# Altium footprint library UCP.PcbLib: 222 footprints (part 10 of 14)
Each footprint in its own frame and in the unit in brackets; x right, y up, seen from the top. Pads: shape width x height; smd on the part's side, far side on the other; paste and mask are expansions set on the pad; w line width, h text height; cw(c..) or ccw(c..) is an arc to the next point about the centre after c.
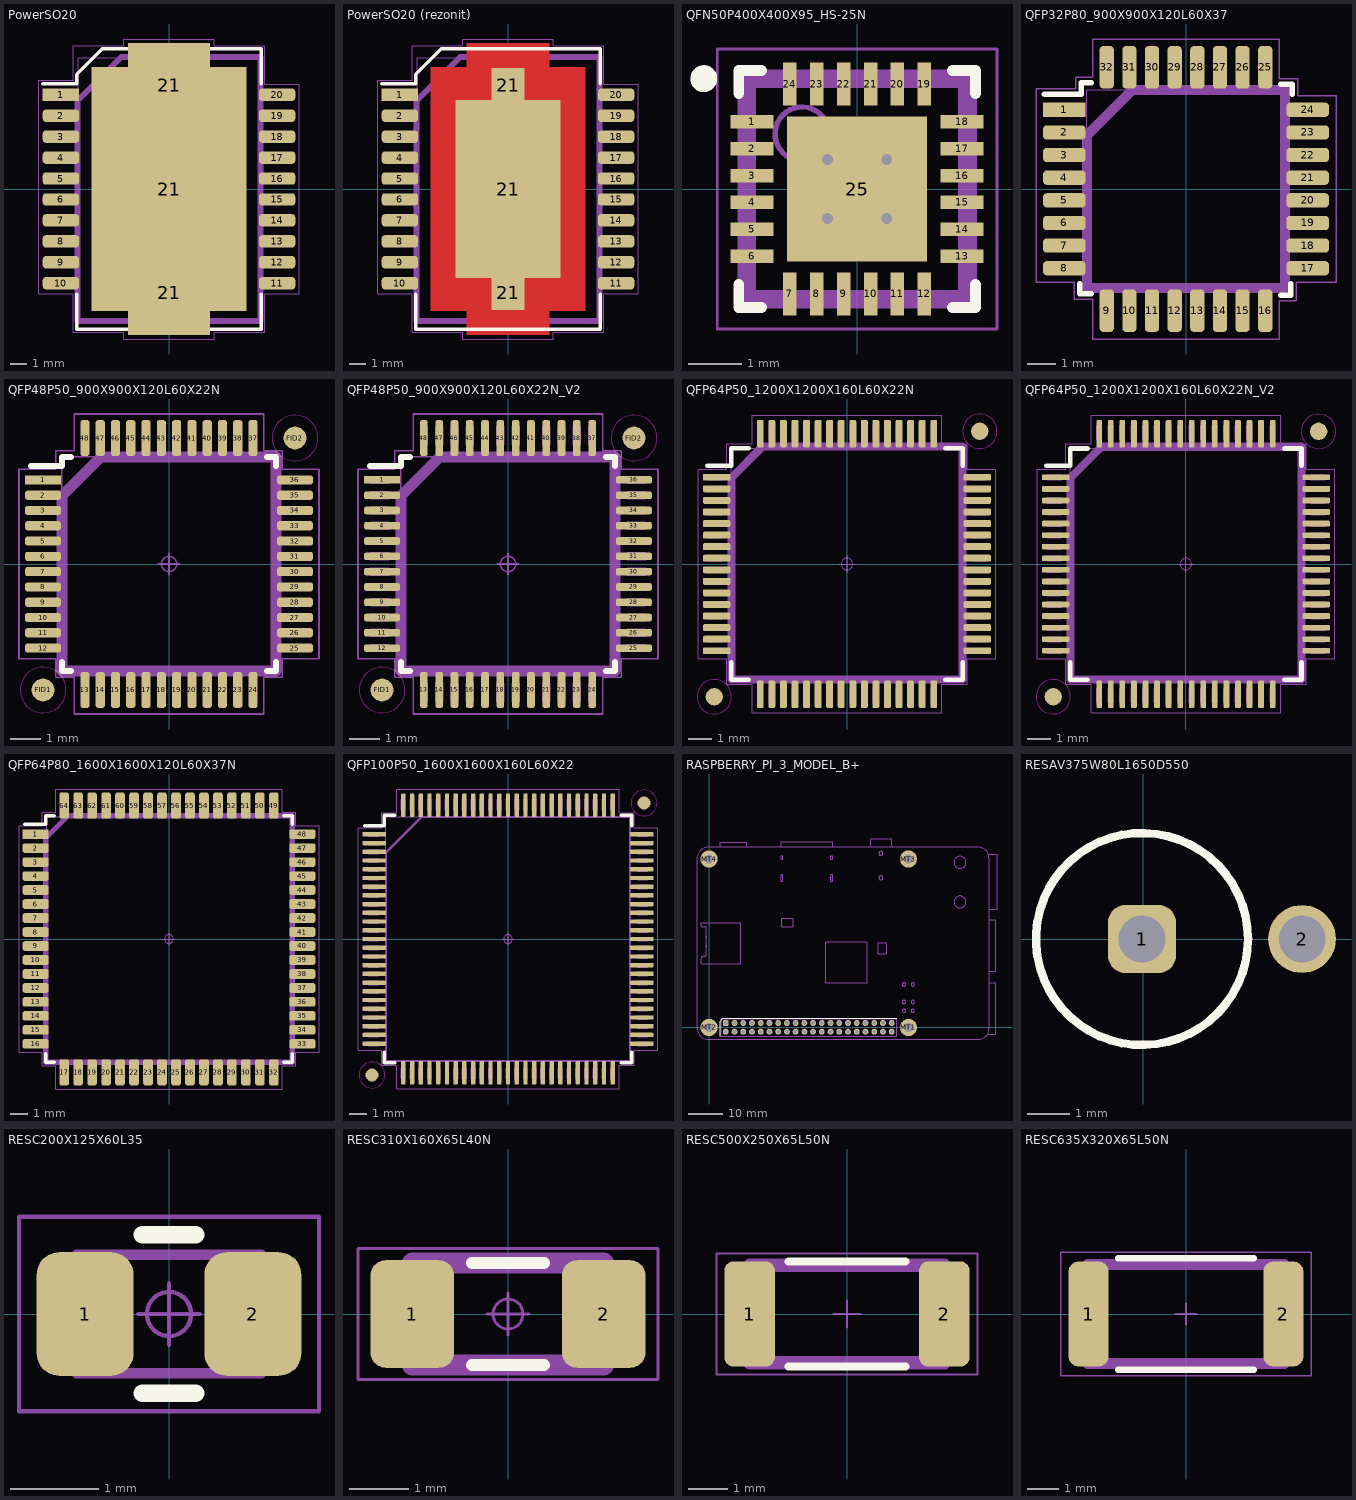
[diagram p9: the footprints below, top view; thin cyan lines are the x and y axes]

## PowerSO20 [mm] "Small Outline IC (SOIC), 1.27 mm pitch; 20 pin, 12.80 mm L X 7.50 mm W X 2.65 mm H body"
height 3.6
pads (23):
  rect 2.2x0.75 smd: 1(-6.56,5.715)
  rrect51% 2.2x0.75 smd: 2(-6.56,4.445) 3(-6.56,3.175) 4(-6.56,1.905) 5(-6.56,0.635) 6(-6.56,-0.635) 7(-6.56,-1.905) 8(-6.56,-3.175) 9(-6.56,-4.445) 10(-6.56,-5.715) 11(6.56,-5.715) 12(6.56,-4.445) 13(6.56,-3.175) 14(6.56,-1.905) 15(6.56,-0.635) 16(6.56,0.635) 17(6.56,1.905) 18(6.56,3.175) 19(6.56,4.445) 20(6.56,5.715)
  rect 5x5.1 smd paste-20 mask-10: 21(0,-6.3) 21(0,6.3)
  rect 9.4x14.8 smd paste-20 mask-10: 21(0,0)
Top Overlay:
  lines w0.2: -7.66,6.39 -5.6,6.39 -5.6,6.95 -4.05,8.5 5.6,8.5 5.6,6.39 ; -5.6,-6.39 -5.6,-8.5 5.6,-8.5 5.6,-6.39
Top Paste:
  region: -1.7,5.9 -1.7,8 -1.7,8.04 -1.67,8.113 -1.613,8.17 -1.54,8.2 -1.5,8.2 1.5,8.2 1.54,8.2 1.613,8.169 1.67,8.113 1.7,8.04 1.7,8 1.7,5.9 1.7,5.86 1.67,5.787 1.613,5.73 1.54,5.7 1.5,5.7 -1.5,5.7 -1.54,5.7 -1.613,5.73 -1.67,5.787 -1.7,5.86
  region: -1.7,-8.2 -1.7,-5.7 1.7,-5.7 1.7,-8.2
  region: -3.2,3.325 -3.2,4.175 -3.2,4.215 -3.17,4.288 -3.113,4.344 -3.04,4.375 -3,4.375 3,4.375 3.04,4.375 3.113,4.345 3.17,4.288 3.2,4.215 3.2,4.175 3.2,3.325 3.2,3.285 3.169,3.212 3.113,3.155 3.04,3.125 3,3.125 -3,3.125 -3.04,3.125 -3.113,3.155 -3.17,3.212 -3.2,3.285
  region: -3.2,0.825 -3.2,1.675 -3.2,1.715 -3.17,1.788 -3.113,1.844 -3.04,1.875 -3,1.875 3,1.875 3.04,1.875 3.113,1.845 3.17,1.788 3.2,1.715 3.2,1.675 3.2,0.825 3.2,0.785 3.169,0.712 3.113,0.655 3.04,0.625 3,0.625 -3,0.625 -3.04,0.625 -3.113,0.655 -3.17,0.712 -3.2,0.785
  region: 3.2,-3.325 3.2,-4.175 3.2,-4.215 3.17,-4.288 3.113,-4.344 3.04,-4.375 3,-4.375 -3,-4.375 -3.04,-4.375 -3.113,-4.345 -3.17,-4.288 -3.2,-4.215 -3.2,-4.175 -3.2,-3.325 -3.2,-3.285 -3.169,-3.212 -3.113,-3.155 -3.04,-3.125 -3,-3.125 3,-3.125 3.04,-3.125 3.113,-3.155 3.17,-3.212 3.2,-3.285
  region: 3.2,-0.825 3.2,-1.675 3.2,-1.715 3.17,-1.788 3.113,-1.844 3.04,-1.875 3,-1.875 -3,-1.875 -3.04,-1.875 -3.113,-1.845 -3.17,-1.788 -3.2,-1.715 -3.2,-1.675 -3.2,-0.825 -3.2,-0.785 -3.169,-0.712 -3.113,-0.655 -3.04,-0.625 -3,-0.625 3,-0.625 3.04,-0.625 3.113,-0.655 3.17,-0.712 3.2,-0.785
Top Solder:
  drawing of 157 lines, arcs and shapes, not listed
Top Designator:
  text ".Designator" at 0,0 h1.5
Top Assembly:
  lines w0.35: -5.55,-8 5.55,-8 5.55,8 -2.9,8 -5.55,5.35 -5.55,-8
Top Courtyard:
  circle w0.05: c0,0 r0.25
  lines w0.05: -0.35,0 0.35,0 ; 0,-0.35 0,0.35 ; 2.745,-9.096 2.745,-8.7 5.8,-8.7 5.8,-6.34 7.91,-6.34 7.91,6.35 5.8,6.35 5.8,8.7 2.745,8.7 2.745,9.096 ; 2.75,-9.1 -2.75,-9.1 -2.75,-8.7 -5.8,-8.7 -5.8,-6.34 -7.91,-6.34 -7.91,6.6 -5.8,6.6 -5.8,8.7 -2.75,8.7 -2.75,9.1 2.75,9.1
Top Component Outline:
  lines w0.05: -5.5,-7.95 -5.5,7.95 5.5,7.95 5.5,-7.95 -5.5,-7.95
Top Component Terminal:
  rectangle: 6.085,-5.947 7.035,-5.482
  rectangle: 6.085,-4.677 7.035,-4.212
  rectangle: 6.085,-3.407 7.035,-2.942
  rectangle: 6.085,-2.137 7.035,-1.672
  rectangle: 6.085,-0.867 7.035,-0.402
  rectangle: 6.085,0.403 7.035,0.868
  rectangle: 6.085,1.673 7.035,2.138
  rectangle: 6.085,2.943 7.035,3.408
  rectangle: 6.085,4.213 7.035,4.678
  rectangle: 6.085,5.483 7.035,5.948
  rectangle: -7.035,-5.947 -6.085,-5.482
  rectangle: -7.035,-4.677 -6.085,-4.212
  rectangle: -7.035,-3.407 -6.085,-2.942
  rectangle: -7.035,-2.137 -6.085,-1.672
  rectangle: -7.035,-0.867 -6.085,-0.402
  rectangle: -7.047,0.425 -6.097,0.89
  rectangle: -7.035,1.673 -6.085,2.138
  rectangle: -7.035,2.943 -6.085,3.408
  rectangle: -7.035,4.213 -6.085,4.678
  rectangle: -7.035,5.483 -6.085,5.948
  region: -1.45,7.95 1.45,7.95 1.45,4.8 3,4.8 3,-4.8 1.45,-4.8 1.45,-7.95 -1.45,-7.95 -1.45,-4.8 -3,-4.8 -3,4.8 -1.45,4.8
3D body "PowerSO20.stp": height 3.6, standoff 0, extent -7.1,-7.95 7.1,7.95

## PowerSO20 (rezonit) [mm] "Small Outline IC (SOIC), 1.27 mm pitch; 20 pin, 12.80 mm L X 7.50 mm W X 2.65 mm H body"
height 3.6
pads (23):
  rect 2.2x0.75 smd: 1(-6.56,5.715)
  rrect51% 2.2x0.75 smd: 2(-6.56,4.445) 3(-6.56,3.175) 4(-6.56,1.905) 5(-6.56,0.635) 6(-6.56,-0.635) 7(-6.56,-1.905) 8(-6.56,-3.175) 9(-6.56,-4.445) 10(-6.56,-5.715) 11(6.56,-5.715) 12(6.56,-4.445) 13(6.56,-3.175) 14(6.56,-1.905) 15(6.56,-0.635) 16(6.56,0.635) 17(6.56,1.905) 18(6.56,3.175) 19(6.56,4.445) 20(6.56,5.715)
  rect 2x2.1 smd paste-20 mask-10: 21(0,-6.3) 21(0,6.3)
  rect 6.4x10.8 smd paste-20 mask-10: 21(0,0)
Top Layer:
  region: -4.7,7.4 -2.5,7.4 -2.5,8.85 2.5,8.85 2.5,7.4 4.7,7.4 4.7,-7.4 2.5,-7.4 2.5,-8.85 -2.5,-8.85 -2.5,-7.4 -4.7,-7.4
Top Overlay:
  lines w0.2: -7.66,6.39 -5.6,6.39 -5.6,6.95 -4.05,8.5 5.6,8.5 5.6,6.39 ; -5.6,-6.39 -5.6,-8.5 5.6,-8.5 5.6,-6.39
Top Paste:
  region: 3.2,-0.825 3.2,-1.675 3.2,-1.715 3.17,-1.788 3.113,-1.844 3.04,-1.875 3,-1.875 -3,-1.875 -3.04,-1.875 -3.113,-1.845 -3.17,-1.788 -3.2,-1.715 -3.2,-1.675 -3.2,-0.825 -3.2,-0.785 -3.169,-0.712 -3.113,-0.655 -3.04,-0.625 -3,-0.625 3,-0.625 3.04,-0.625 3.113,-0.655 3.17,-0.712 3.2,-0.785
  region: 3.2,-3.325 3.2,-4.175 3.2,-4.215 3.17,-4.288 3.113,-4.344 3.04,-4.375 3,-4.375 -3,-4.375 -3.04,-4.375 -3.113,-4.345 -3.17,-4.288 -3.2,-4.215 -3.2,-4.175 -3.2,-3.325 -3.2,-3.285 -3.169,-3.212 -3.113,-3.155 -3.04,-3.125 -3,-3.125 3,-3.125 3.04,-3.125 3.113,-3.155 3.17,-3.212 3.2,-3.285
  region: -3.2,0.825 -3.2,1.675 -3.2,1.715 -3.17,1.788 -3.113,1.844 -3.04,1.875 -3,1.875 3,1.875 3.04,1.875 3.113,1.845 3.17,1.788 3.2,1.715 3.2,1.675 3.2,0.825 3.2,0.785 3.169,0.712 3.113,0.655 3.04,0.625 3,0.625 -3,0.625 -3.04,0.625 -3.113,0.655 -3.17,0.712 -3.2,0.785
  region: -3.2,3.325 -3.2,4.175 -3.2,4.215 -3.17,4.288 -3.113,4.344 -3.04,4.375 -3,4.375 3,4.375 3.04,4.375 3.113,4.345 3.17,4.288 3.2,4.215 3.2,4.175 3.2,3.325 3.2,3.285 3.169,3.212 3.113,3.155 3.04,3.125 3,3.125 -3,3.125 -3.04,3.125 -3.113,3.155 -3.17,3.212 -3.2,3.285
  region: -1.7,-8.2 -1.7,-5.7 1.7,-5.7 1.7,-8.2
  region: -1.7,5.9 -1.7,8 -1.7,8.04 -1.67,8.113 -1.613,8.17 -1.54,8.2 -1.5,8.2 1.5,8.2 1.54,8.2 1.613,8.169 1.67,8.113 1.7,8.04 1.7,8 1.7,5.9 1.7,5.86 1.67,5.787 1.613,5.73 1.54,5.7 1.5,5.7 -1.5,5.7 -1.54,5.7 -1.613,5.73 -1.67,5.787 -1.7,5.86
Top Solder:
  drawing of 157 lines, arcs and shapes, not listed
Top Designator:
  text ".Designator" at 0,0 h1.5
Top Assembly:
  lines w0.35: -5.55,-8 -5.55,5.35 -2.9,8 5.55,8 5.55,-8 -5.55,-8
Top Courtyard:
  circle w0.05: c0,0 r0.25
  lines w0.05: -0.35,0 0.35,0 ; 0,-0.35 0,0.35 ; 2.745,-9.096 2.745,-8.7 5.8,-8.7 5.8,-6.34 7.91,-6.34 7.91,6.35 5.8,6.35 5.8,8.7 2.745,8.7 2.745,9.096 ; 2.75,-9.1 -2.75,-9.1 -2.75,-8.7 -5.8,-8.7 -5.8,-6.34 -7.91,-6.34 -7.91,6.6 -5.8,6.6 -5.8,8.7 -2.75,8.7 -2.75,9.1 2.75,9.1
Top Component Outline:
  lines w0.05: -5.5,-7.95 5.5,-7.95 5.5,7.95 -5.5,7.95 -5.5,-7.95
Top Component Terminal:
  rectangle: -7.035,5.483 -6.085,5.948
  rectangle: -7.035,4.213 -6.085,4.678
  rectangle: -7.035,2.943 -6.085,3.408
  rectangle: -7.035,1.673 -6.085,2.138
  rectangle: -7.047,0.425 -6.097,0.89
  rectangle: -7.035,-0.867 -6.085,-0.402
  rectangle: -7.035,-2.137 -6.085,-1.672
  rectangle: -7.035,-3.407 -6.085,-2.942
  rectangle: -7.035,-4.677 -6.085,-4.212
  rectangle: -7.035,-5.947 -6.085,-5.482
  rectangle: 6.085,5.483 7.035,5.948
  rectangle: 6.085,4.213 7.035,4.678
  rectangle: 6.085,2.943 7.035,3.408
  rectangle: 6.085,1.673 7.035,2.138
  rectangle: 6.085,0.403 7.035,0.868
  rectangle: 6.085,-0.867 7.035,-0.402
  rectangle: 6.085,-2.137 7.035,-1.672
  rectangle: 6.085,-3.407 7.035,-2.942
  rectangle: 6.085,-4.677 7.035,-4.212
  rectangle: 6.085,-5.947 7.035,-5.482
  region: -1.45,7.95 1.45,7.95 1.45,4.8 3,4.8 3,-4.8 1.45,-4.8 1.45,-7.95 -1.45,-7.95 -1.45,-4.8 -3,-4.8 -3,4.8 -1.45,4.8
3D body "PowerSO20.stp": height 3.6, standoff 0, extent -7.1,-7.95 7.1,7.95

## QFN50P400X400X95_HS-25N [mm] "QFN, 24-Leads, Body 4,00x4,00mm, Pitch 0,50mm, Thermal Pad 2,60x2,70mm, IPC Medium Density"
height 0.95
pads (25):
  rect 0.8x0.25 smd: 1(-1.95,1.25) 2(-1.95,0.75) 3(-1.95,0.25) 4(-1.95,-0.25) 5(-1.95,-0.75) 6(-1.95,-1.25) 13(1.95,-1.25) 14(1.95,-0.75) 15(1.95,-0.25) 16(1.95,0.25) 17(1.95,0.75) 18(1.95,1.25)
  rect 0.25x0.8 smd: 7(-1.25,-1.95) 8(-0.75,-1.95) 9(-0.25,-1.95) 10(0.25,-1.95) 11(0.75,-1.95) 12(1.25,-1.95) 19(1.25,1.95) 20(0.75,1.95) 21(0.25,1.95) 22(-0.25,1.95) 23(-0.75,1.95) 24(-1.25,1.95)
  rect 2.6x2.7 smd: 25(0,0)
via -0.55,0.55 diameter 0.5 hole 0.2
via 0.55,0.55 diameter 0.5 hole 0.2
via -0.55,-0.55 diameter 0.5 hole 0.2
via 0.55,-0.55 diameter 0.5 hole 0.2
Top Overlay:
  circle w0.25: c-2.85,2.05 r0.125
  lines w0.2: -2.2,-1.775 -2.2,-2.2 -1.775,-2.2 ; -2.2,1.775 -2.2,2.2 -1.775,2.2 ; 1.775,-2.2 2.2,-2.2 2.2,-1.775 ; 1.775,2.2 2.2,2.2 2.2,1.775
Top Assembly:
  circle w0.1: c-1.025,1.025 r0.5
  lines w0.35: -2.05,-2.05 -2.05,2.05 2.05,2.05 2.05,-2.05 -2.05,-2.05
Top Courtyard:
  lines w0.05: -2.6,-2.6 -2.6,2.6 2.6,2.6 2.6,-2.6 -2.6,-2.6
  lines w0.1: -0.5,0 0.5,0 ; 0,-0.5 0,0.5
3D body "QFN50P400X400X95_HS-25N.step": height 0.95, standoff 0, extent -2.051,-2.051 2.051,2.051

## QFP32P80_900X900X120L60X37 [mm] "Quad Flat Pack (QFP), 0.80 mm pitch;  square, 8 pin X 8 pin, 7.00 mm L X 7.00 mm W X 1.20 mm H body"
height 1.2
pads (32):
  rect 1.5x0.5 smd: 1(-4.3,2.8)
  rrect50% 1.5x0.5 smd: 2(-4.3,2) 3(-4.3,1.2) 4(-4.3,0.4) 5(-4.3,-0.4) 6(-4.3,-1.2) 7(-4.3,-2) 8(-4.3,-2.8) 17(4.3,-2.8) 18(4.3,-2) 19(4.3,-1.2) 20(4.3,-0.4) 21(4.3,0.4) 22(4.3,1.2) 23(4.3,2) 24(4.3,2.8)
  rrect50% 0.5x1.5 smd: 9(-2.8,-4.3) 10(-2,-4.3) 11(-1.2,-4.3) 12(-0.4,-4.3) 13(0.4,-4.3) 14(1.2,-4.3) 15(2,-4.3) 16(2.8,-4.3) 25(2.8,4.3) 26(2,4.3) 27(1.2,4.3) 28(0.4,4.3) 29(-0.4,4.3) 30(-1.2,4.3) 31(-2,4.3) 32(-2.8,4.3)
Top Overlay:
  lines w0.2: -5,3.35 -3.7,3.35 -3.7,3.75 -3.35,3.75 ; -3.75,-3.35 -3.75,-3.7 -3.35,-3.7 ; 3.35,-3.75 3.7,-3.75 3.7,-3.35 ; 3.35,3.7 3.75,3.7 3.75,3.35
Top Assembly:
  lines w0.35: -3.5,-3.5 3.5,-3.5 3.5,3.5 -1.9,3.5 -3.5,1.9 -3.5,-3.5
Top Courtyard:
  lines w0.05: -5.3,-3.3 -5.3,3.55 -3.9,3.55 -3.9,3.95 -3.3,3.95 -3.3,5.3 3.3,5.3 3.3,3.9 3.95,3.9 3.95,3.3 5.3,3.3 5.3,-3.3 3.9,-3.3 3.9,-3.95 3.3,-3.95 3.3,-5.3 -3.3,-5.3 -3.3,-3.9 -3.95,-3.9 -3.95,-3.3 -5.3,-3.3
Top Component Outline:
  lines w0.025: -3.5,-3.5 3.5,-3.5 3.5,3.5 -3.5,3.5 -3.5,-3.5
Top Component Terminal:
  region: -2.987,4.5 -2.987,3.9 -2.612,3.9 -2.612,4.5
  region: -2.187,4.5 -2.187,3.9 -1.812,3.9 -1.812,4.5
  region: -1.388,4.5 -1.388,3.9 -1.013,3.9 -1.013,4.5
  region: -0.587,4.5 -0.587,3.9 -0.212,3.9 -0.212,4.5
  region: 0.212,4.5 0.212,3.9 0.587,3.9 0.587,4.5
  region: 1.012,4.5 1.012,3.9 1.387,3.9 1.387,4.5
  region: 1.813,4.5 1.813,3.9 2.188,3.9 2.188,4.5
  region: 2.613,4.5 2.613,3.9 2.988,3.9 2.988,4.5
  region: 4.5,2.988 3.9,2.988 3.9,2.613 4.5,2.613
  region: 4.5,2.188 3.9,2.188 3.9,1.813 4.5,1.813
  region: 4.5,1.388 3.9,1.388 3.9,1.013 4.5,1.013
  region: 4.5,0.587 3.9,0.587 3.9,0.212 4.5,0.212
  region: 4.5,-0.212 3.9,-0.212 3.9,-0.587 4.5,-0.587
  region: 4.5,-1.012 3.9,-1.012 3.9,-1.387 4.5,-1.387
  region: 4.5,-1.812 3.9,-1.812 3.9,-2.187 4.5,-2.187
  region: 4.5,-2.612 3.9,-2.612 3.9,-2.987 4.5,-2.987
  region: 2.988,-4.5 2.988,-3.9 2.613,-3.9 2.613,-4.5
  region: 2.188,-4.5 2.188,-3.9 1.813,-3.9 1.813,-4.5
  region: 1.388,-4.5 1.388,-3.9 1.013,-3.9 1.013,-4.5
  region: 0.587,-4.5 0.587,-3.9 0.212,-3.9 0.212,-4.5
  region: -0.212,-4.5 -0.212,-3.9 -0.587,-3.9 -0.587,-4.5
  region: -1.012,-4.5 -1.012,-3.9 -1.387,-3.9 -1.387,-4.5
  region: -1.812,-4.5 -1.812,-3.9 -2.187,-3.9 -2.187,-4.5
  region: -2.612,-4.5 -2.612,-3.9 -2.987,-3.9 -2.987,-4.5
  rectangle: -4.5,-2.987 -3.9,-2.612
  rectangle: -4.5,-2.188 -3.9,-1.813
  rectangle: -4.5,-1.388 -3.9,-1.012
  rectangle: -4.5,-0.587 -3.9,-0.212
  rectangle: -4.5,0.212 -3.9,0.587
  rectangle: -4.5,1.012 -3.9,1.388
  rectangle: -4.5,1.813 -3.9,2.188
  rectangle: -4.5,2.612 -3.9,2.987
3D body "ATmega_AP214.STEP": height 1, standoff -0.1, extent -4.498,-4.498 4.498,4.498

## QFP48P50_900X900X120L60X22N [mm] "Quad Flat Pack (QFP), 0.50 mm pitch; square, 12 pin X 12 pin, 7.00 mm L X 7.00 mm W X 1.20 mm H body"
height 1.2
pads (50):
  rect 1.17x0.3 smd: 1(-4.12,2.75)
  rrect53% 1.17x0.3 smd: 2(-4.12,2.25) 3(-4.12,1.75) 4(-4.12,1.25) 5(-4.12,0.75) 6(-4.12,0.25) 7(-4.12,-0.25) 8(-4.12,-0.75) 9(-4.12,-1.25) 10(-4.12,-1.75) 11(-4.12,-2.25) 12(-4.12,-2.75) 25(4.12,-2.75) 26(4.12,-2.25) 27(4.12,-1.75) 28(4.12,-1.25) 29(4.12,-0.75) 30(4.12,-0.25) 31(4.12,0.25) 32(4.12,0.75) 33(4.12,1.25) 34(4.12,1.75) 35(4.12,2.25) 36(4.12,2.75)
  rrect53% 0.3x1.17 smd: 13(-2.75,-4.12) 14(-2.25,-4.12) 15(-1.75,-4.12) 16(-1.25,-4.12) 17(-0.75,-4.12) 18(-0.25,-4.12) 19(0.25,-4.12) 20(0.75,-4.12) 21(1.25,-4.12) 22(1.75,-4.12) 23(2.25,-4.12) 24(2.75,-4.12) 37(2.75,4.12) 38(2.25,4.12) 39(1.75,4.12) 40(1.25,4.12) 41(0.75,4.12) 42(0.25,4.12) 43(-0.25,4.12) 44(-0.75,4.12) 45(-1.25,4.12) 46(-1.75,4.12) 47(-2.25,4.12) 48(-2.75,4.12)
  round 0.75 smd paste-0.75 mask+0.375: FID1(-4.12,-4.12) FID2(4.12,4.12)
Top Layer keep-out:
  circle w0.025: c4.12,4.12 r0.75
  circle w0.025: c-4.12,-4.12 r0.75
Top Overlay:
  lines w0.2: -4.505,3.2 -3.5,3.2 -3.5,3.5 -3.2,3.5 ; -3.5,-3.2 -3.5,-3.5 -3.2,-3.5 ; 3.2,-3.5 3.5,-3.5 3.5,-3.2 ; 3.2,3.5 3.5,3.5 3.5,3.2
Top Solder:
  region: -3.025,-4.825 -3.025,-3.425 3,-3.425 3,-4.825
  region: 3.415,3.025 4.815,3.025 4.815,-3 3.415,-3
  region: -3.025,3.415 -3.025,4.815 3,4.815 3,3.415
  region: -4.825,3.025 -3.425,3.025 -3.425,-3 -4.825,-3
Top Designator:
  text ".Designator" at 0,0 h1.2
Top Assembly:
  lines w0.35: -3.5,-3.5 3.5,-3.5 3.5,3.5 -2.23,3.5 -3.5,2.23 -3.5,-3.5
Top Courtyard:
  circle w0.05: c0,0 r0.25
  lines w0.05: -0.35,0 0.35,0 ; 0,-0.35 0,0.35 ; -4.905,-3.1 -3.7,-3.1 -3.7,-3.7 -3.1,-3.7 -3.1,-4.905 3.1,-4.905 3.1,-3.7 3.7,-3.7 3.7,-3.1 4.905,-3.1 4.905,3.1 3.7,3.1 3.7,3.7 3.1,3.7 3.1,4.905 -3.1,4.905 -3.1,3.7 -3.7,3.7 -3.7,3.1 -4.905,3.1 -4.905,-3.1
Top Component Outline:
  lines w0.05: -3.5,-3.5 3.5,-3.5 3.5,3.5 -3.5,3.5 -3.5,-3.5
Top Component Terminal:
  drawing of 192 lines, arcs and shapes, not listed
3D body "QFP48P50_900X900X120L60X22.STEP": height 1.2, standoff 0, extent -4.5,-4.5 4.5,4.5

## QFP48P50_900X900X120L60X22N_V2 [mm] "Quad Flat Pack (QFP), 0.50 mm pitch; square, 12 pin X 12 pin, 7.00 mm L X 7.00 mm W X 1.20 mm H body"
height 1.2
pads (50):
  rect 1.17x0.25 smd mask+0.05: 1(-4.12,2.75)
  rrect53% 1.17x0.25 smd mask+0.05: 2(-4.12,2.25) 3(-4.12,1.75) 4(-4.12,1.25) 5(-4.12,0.75) 6(-4.12,0.25) 7(-4.12,-0.25) 8(-4.12,-0.75) 9(-4.12,-1.25) 10(-4.12,-1.75) 11(-4.12,-2.25) 12(-4.12,-2.75) 25(4.12,-2.75) 26(4.12,-2.25) 27(4.12,-1.75) 28(4.12,-1.25) 29(4.12,-0.75) 30(4.12,-0.25) 31(4.12,0.25) 32(4.12,0.75) 33(4.12,1.25) 34(4.12,1.75) 35(4.12,2.25) 36(4.12,2.75)
  rrect53% 0.25x1.17 smd mask+0.05: 13(-2.75,-4.12) 14(-2.25,-4.12) 15(-1.75,-4.12) 16(-1.25,-4.12) 17(-0.75,-4.12) 18(-0.25,-4.12) 19(0.25,-4.12) 20(0.75,-4.12) 21(1.25,-4.12) 22(1.75,-4.12) 23(2.25,-4.12) 24(2.75,-4.12) 37(2.75,4.12) 38(2.25,4.12) 39(1.75,4.12) 40(1.25,4.12) 41(0.75,4.12) 42(0.25,4.12) 43(-0.25,4.12) 44(-0.75,4.12) 45(-1.25,4.12) 46(-1.75,4.12) 47(-2.25,4.12) 48(-2.75,4.12)
  round 0.75 smd paste-0.75 mask+0.375: FID1(-4.12,-4.12) FID2(4.12,4.12)
Top Layer keep-out:
  circle w0.025: c4.12,4.12 r0.75
  circle w0.025: c-4.12,-4.12 r0.75
Top Overlay:
  lines w0.2: -4.505,3.2 -3.5,3.2 -3.5,3.5 -3.2,3.5 ; -3.5,-3.2 -3.5,-3.5 -3.2,-3.5 ; 3.2,-3.5 3.5,-3.5 3.5,-3.2 ; 3.2,3.5 3.5,3.5 3.5,3.2
Top Designator:
  text ".Designator" at 0,0 h1.2
Top Assembly:
  lines w0.35: -3.5,-3.5 3.5,-3.5 3.5,3.5 -2.23,3.5 -3.5,2.23 -3.5,-3.5
Top Courtyard:
  circle w0.05: c0,0 r0.25
  lines w0.05: -0.35,0 0.35,0 ; 0,-0.35 0,0.35 ; -4.905,-3.1 -3.7,-3.1 -3.7,-3.7 -3.1,-3.7 -3.1,-4.905 3.1,-4.905 3.1,-3.7 3.7,-3.7 3.7,-3.1 4.905,-3.1 4.905,3.1 3.7,3.1 3.7,3.7 3.1,3.7 3.1,4.905 -3.1,4.905 -3.1,3.7 -3.7,3.7 -3.7,3.1 -4.905,3.1 -4.905,-3.1
Top Component Outline:
  lines w0.05: -3.5,-3.5 3.5,-3.5 3.5,3.5 -3.5,3.5 -3.5,-3.5
Top Component Terminal:
  drawing of 192 lines, arcs and shapes, not listed
3D body "QFP48P50_900X900X120L60X22.STEP": height 1.2, standoff 0, extent -4.5,-4.5 4.5,4.5

## QFP64P50_1200X1200X160L60X22N [mm] "Quad Flat Pack (QFP), 0.50 mm pitch; square, 16 pin X 16 pin, 10.00 mm L X 10.00 mm W X 1.60 mm H body"
height 1.6
pads (66):
  rect 1.2x0.3 smd mask-1: 1(-5.635,3.75)
  rrect53% 1.2x0.3 smd mask-1: 2(-5.635,3.25) 3(-5.635,2.75) 4(-5.635,2.25) 5(-5.635,1.75) 6(-5.635,1.25) 7(-5.635,0.75) 8(-5.635,0.25) 9(-5.635,-0.25) 10(-5.635,-0.75) 11(-5.635,-1.25) 12(-5.635,-1.75) 13(-5.635,-2.25) 14(-5.635,-2.75) 15(-5.635,-3.25) 16(-5.635,-3.75) 33(5.635,-3.75) 34(5.635,-3.25) 35(5.635,-2.75) 36(5.635,-2.25) 37(5.635,-1.75) 38(5.635,-1.25) 39(5.635,-0.75) 40(5.635,-0.25) 41(5.635,0.25) 42(5.635,0.75) 43(5.635,1.25) 44(5.635,1.75) 45(5.635,2.25) 46(5.635,2.75) 47(5.635,3.25) 48(5.635,3.75)
  rrect53% 0.3x1.2 smd mask-1: 17(-3.75,-5.635) 18(-3.25,-5.635) 19(-2.75,-5.635) 20(-2.25,-5.635) 21(-1.75,-5.635) 22(-1.25,-5.635) 23(-0.75,-5.635) 24(-0.25,-5.635) 25(0.25,-5.635) 26(0.75,-5.635) 27(1.25,-5.635) 28(1.75,-5.635) 29(2.25,-5.635) 30(2.75,-5.635) 31(3.25,-5.635) 32(3.75,-5.635) 49(3.75,5.635) 50(3.25,5.635) 51(2.75,5.635) 52(2.25,5.635) 53(1.75,5.635) 54(1.25,5.635) 55(0.75,5.635) 56(0.25,5.635) 57(-0.25,5.635) 58(-0.75,5.635) 59(-1.25,5.635) 60(-1.75,5.635) 61(-2.25,5.635) 62(-2.75,5.635) 63(-3.25,5.635) 64(-3.75,5.635)
  round 0.75 smd paste-0.75 mask+0.375: FID1(-5.74,-5.74) FID2(5.74,5.74)
Top Layer keep-out:
  circle w0.01: c-5.74,-5.74 r0.745
  circle w0.01: c5.74,5.74 r0.745
Top Overlay:
  lines w0.2: -6.035,4.25 -5,4.25 -5,5 -4.25,5 ; -5,-4.25 -5,-5 -4.25,-5 ; 4.25,-5 5,-5 5,-4.25 ; 4.25,5 5,5 5,4.25
Top Solder:
  region: -3.95,4.985 -3.95,6.285 3.95,6.285 3.95,4.985
  region: 4.985,3.95 6.285,3.95 6.285,-3.95 4.985,-3.95
  region: -3.95,-6.285 -3.95,-4.985 3.95,-4.985 3.95,-6.285
  region: -6.285,3.95 -4.985,3.95 -4.985,-3.95 -6.285,-3.95
Top Designator:
  text ".Designator" at 0,0 h1.2
Top Assembly:
  lines w0.35: -5,-5 -5,3.73 -3.655,5.075 5,5.075 5,-5 -5,-5
Top Courtyard:
  circle w0.05: c0,0 r0.25
  lines w0.05: -0.35,0 0.35,0 ; 0,-0.35 0,0.35 ; -6.435,-4.1 -6.435,4.1 -5.2,4.1 -5.2,5.2 -4.1,5.2 -4.1,6.435 4.1,6.435 4.1,5.2 5.2,5.2 5.2,4.1 6.435,4.1 6.435,-4.1 5.2,-4.1 5.2,-5.2 4.1,-5.2 4.1,-6.435 -4.1,-6.435 -4.1,-5.2 -5.2,-5.2 -5.2,-4.1 -6.435,-4.1
Top Component Outline:
  lines w0.05: -5,-5 -5,5 5,5 5,-5 -5,-5
Top Component Terminal:
  drawing of 256 lines, arcs and shapes, not listed
3D body "QFP64P50_1200X1200X160L60X22.STEP": height 1.6, standoff 0, extent -6,-6 6,6

## QFP64P50_1200X1200X160L60X22N_V2 [mm] "Quad Flat Pack (QFP), 0.50 mm pitch; square, 16 pin X 16 pin, 10.00 mm L X 10.00 mm W X 1.60 mm H body"
height 1.6
pads (66):
  rect 1.2x0.25 smd mask+0.05: 1(-5.635,3.75)
  rrect53% 1.2x0.25 smd mask+0.05: 2(-5.635,3.25) 3(-5.635,2.75) 4(-5.635,2.25) 5(-5.635,1.75) 6(-5.635,1.25) 7(-5.635,0.75) 8(-5.635,0.25) 9(-5.635,-0.25) 10(-5.635,-0.75) 11(-5.635,-1.25) 12(-5.635,-1.75) 13(-5.635,-2.25) 14(-5.635,-2.75) 15(-5.635,-3.25) 16(-5.635,-3.75) 33(5.635,-3.75) 34(5.635,-3.25) 35(5.635,-2.75) 36(5.635,-2.25) 37(5.635,-1.75) 38(5.635,-1.25) 39(5.635,-0.75) 40(5.635,-0.25) 41(5.635,0.25) 42(5.635,0.75) 43(5.635,1.25) 44(5.635,1.75) 45(5.635,2.25) 46(5.635,2.75) 47(5.635,3.25) 48(5.635,3.75)
  rrect53% 0.25x1.2 smd mask+0.05: 17(-3.75,-5.635) 18(-3.25,-5.635) 19(-2.75,-5.635) 20(-2.25,-5.635) 21(-1.75,-5.635) 22(-1.25,-5.635) 23(-0.75,-5.635) 24(-0.25,-5.635) 25(0.25,-5.635) 26(0.75,-5.635) 27(1.25,-5.635) 28(1.75,-5.635) 29(2.25,-5.635) 30(2.75,-5.635) 31(3.25,-5.635) 32(3.75,-5.635) 49(3.75,5.635) 50(3.25,5.635) 51(2.75,5.635) 52(2.25,5.635) 53(1.75,5.635) 54(1.25,5.635) 55(0.75,5.635) 56(0.25,5.635) 57(-0.25,5.635) 58(-0.75,5.635) 59(-1.25,5.635) 60(-1.75,5.635) 61(-2.25,5.635) 62(-2.75,5.635) 63(-3.25,5.635) 64(-3.75,5.635)
  round 0.75 smd mask+0.375: FID1(-5.74,-5.74)
  round 0.75 smd mask-0.375: FID2(5.74,5.74)
Top Layer keep-out:
  circle w0.01: c-5.74,-5.74 r0.745
  circle w0.01: c5.74,5.74 r0.745
Top Overlay:
  lines w0.2: -6.035,4.25 -5,4.25 -5,5 -4.25,5 ; -5,-4.25 -5,-5 -4.25,-5 ; 4.25,-5 5,-5 5,-4.25 ; 4.25,5 5,5 5,4.25
Top Solder:
  region: 5.74,4.99 5.666,4.99 5.521,5.019 5.385,5.075 5.262,5.157 5.157,5.262 5.075,5.385 5.019,5.521 4.99,5.666 4.99,5.74 4.99,5.814 5.019,5.959 5.075,6.095 5.157,6.218 5.262,6.323 5.385,6.405 5.521,6.461 5.666,6.49 5.74,6.49 5.814,6.49 5.959,6.461 6.095,6.405 6.218,6.323 6.323,6.218 6.405,6.095 6.461,5.959 6.49,5.814 6.49,5.74 6.49,5.666 6.461,5.521 6.405,5.385 6.323,5.262 6.218,5.157 6.095,5.075 5.959,5.019 5.814,4.99
Top Designator:
  text ".Designator" at 0,0 h1.2
Top Assembly:
  lines w0.35: -5,-5 5,-5 5,5.075 -3.655,5.075 -5,3.73 -5,-5
Top Courtyard:
  circle w0.05: c0,0 r0.25
  lines w0.05: -0.35,0 0.35,0 ; 0,-0.35 0,0.35 ; -6.435,-4.1 -5.2,-4.1 -5.2,-5.2 -4.1,-5.2 -4.1,-6.435 4.1,-6.435 4.1,-5.2 5.2,-5.2 5.2,-4.1 6.435,-4.1 6.435,4.1 5.2,4.1 5.2,5.2 4.1,5.2 4.1,6.435 -4.1,6.435 -4.1,5.2 -5.2,5.2 -5.2,4.1 -6.435,4.1 -6.435,-4.1
Top Component Outline:
  lines w0.05: -5,-5 5,-5 5,5 -5,5 -5,-5
Top Component Terminal:
  drawing of 256 lines, arcs and shapes, not listed
3D body "QFP64P50_1200X1200X160L60X22.STEP": height 1.6, standoff 0, extent -6,-6 6,6

## QFP64P80_1600X1600X120L60X37N [mm] "Quad Flat Pack (QFP), 0.80 mm pitch; square, 16 pin X 16 pin, 14.00 mm L X 14.00 mm W X 1.20 mm H body"
height 1.2
pads (64):
  rect 1.5x0.55 smd: 1(-7.63,6)
  rrect49% 1.5x0.55 smd: 2(-7.63,5.2) 3(-7.63,4.4) 4(-7.63,3.6) 5(-7.63,2.8) 6(-7.63,2) 7(-7.63,1.2) 8(-7.63,0.4) 9(-7.63,-0.4) 10(-7.63,-1.2) 11(-7.63,-2) 12(-7.63,-2.8) 13(-7.63,-3.6) 14(-7.63,-4.4) 15(-7.63,-5.2) 16(-7.63,-6) 33(7.63,-6) 34(7.63,-5.2) 35(7.63,-4.4) 36(7.63,-3.6) 37(7.63,-2.8) 38(7.63,-2) 39(7.63,-1.2) 40(7.63,-0.4) 41(7.63,0.4) 42(7.63,1.2) 43(7.63,2) 44(7.63,2.8) 45(7.63,3.6) 46(7.63,4.4) 47(7.63,5.2) 48(7.63,6)
  rrect49% 0.55x1.5 smd: 17(-6,-7.63) 18(-5.2,-7.63) 19(-4.4,-7.63) 20(-3.6,-7.63) 21(-2.8,-7.63) 22(-2,-7.63) 23(-1.2,-7.63) 24(-0.4,-7.63) 25(0.4,-7.63) 26(1.2,-7.63) 27(2,-7.63) 28(2.8,-7.63) 29(3.6,-7.63) 30(4.4,-7.63) 31(5.2,-7.63) 32(6,-7.63) 49(6,7.63) 50(5.2,7.63) 51(4.4,7.63) 52(3.6,7.63) 53(2.8,7.63) 54(2,7.63) 55(1.2,7.63) 56(0.4,7.63) 57(-0.4,7.63) 58(-1.2,7.63) 59(-2,7.63) 60(-2.8,7.63) 61(-3.6,7.63) 62(-4.4,7.63) 63(-5.2,7.63) 64(-6,7.63)
Top Overlay:
  lines w0.2: -8.26,6.55 -7.05,6.55 -7.05,7.05 -6.55,7.05 ; -7.05,-6.55 -7.05,-7.05 -6.55,-7.05 ; 6.55,-7.05 7.05,-7.05 7.05,-6.55 ; 6.55,7.05 7.05,7.05 7.05,6.55
Top Designator:
  text ".Designator" at -4,0 h2.5
Top Assembly:
  lines w0.3: -7.05,-7.05 -7.05,5.78 -5.78,7.05 7.05,7.05 7.05,-7.05 -7.05,-7.05
Top Courtyard:
  circle w0.05: c0,0 r0.25
  lines w0.05: -0.35,0 0.35,0 ; 0,-0.35 0,0.35 ; -8.58,-6.485 -8.58,6.485 -7.25,6.485 -7.25,7.25 -6.485,7.25 -6.485,8.58 6.485,8.58 6.485,7.25 7.25,7.25 7.25,6.485 8.58,6.485 8.58,-6.485 7.25,-6.485 7.25,-7.25 6.485,-7.25 6.485,-8.58 -6.485,-8.58 -6.485,-7.25 -7.25,-7.25 -7.25,-6.485 -8.58,-6.485
Top Component Outline:
  lines w0.025: -7,-7 -7,7 7,7 7,-7 -7,-7
Top Component Terminal:
  drawing of 256 lines, arcs and shapes, not listed
3D body "QFP64P80_1600X1600X120L60X37.STEP": height 1.2, standoff 0, extent -8,-8 8,8

## QFP100P50_1600X1600X160L60X22 [mm] "Quad Flat Pack (QFP), 0.50 mm pitch; 100 pin, 14.20 mm L X 14.20 mm W X 1.60 mm H body"
pads (102):
  rect 1.35x0.25 smd mask+0.05: 1(-7.675,6)
  rrect50% 1.35x0.25 smd mask+0.05: 2(-7.675,5.5) 3(-7.675,5) 4(-7.675,4.5) 5(-7.675,4) 6(-7.675,3.5) 7(-7.675,3) 8(-7.675,2.5) 9(-7.675,2) 10(-7.675,1.5) 11(-7.675,1) 12(-7.675,0.5) 13(-7.675,0) 14(-7.675,-0.5) 15(-7.675,-1) 16(-7.675,-1.5) 17(-7.675,-2) 18(-7.675,-2.5) 19(-7.675,-3) 20(-7.675,-3.5) 21(-7.675,-4) 22(-7.675,-4.5) 23(-7.675,-5) 24(-7.675,-5.5) 25(-7.675,-6) 51(7.675,-6) 52(7.675,-5.5) 53(7.675,-5) 54(7.675,-4.5) 55(7.675,-4) 56(7.675,-3.5) 57(7.675,-3) 58(7.675,-2.5) 59(7.675,-2) 60(7.675,-1.5) 61(7.675,-1) 62(7.675,-0.5) 63(7.675,0) 64(7.675,0.5) 65(7.675,1) 66(7.675,1.5) 67(7.675,2) 68(7.675,2.5) 69(7.675,3) 70(7.675,3.5) 71(7.675,4) 72(7.675,4.5) 73(7.675,5) 74(7.675,5.5) 75(7.675,6)
  rrect50% 0.25x1.35 smd mask+0.05: 26(-6,-7.675) 27(-5.5,-7.675) 28(-5,-7.675) 29(-4.5,-7.675) 30(-4,-7.675) 31(-3.5,-7.675) 32(-3,-7.675) 33(-2.5,-7.675) 34(-2,-7.675) 35(-1.5,-7.675) 36(-1,-7.675) 37(-0.5,-7.675) 38(0,-7.675) 39(0.5,-7.675) 40(1,-7.675) 41(1.5,-7.675) 42(2,-7.675) 43(2.5,-7.675) 44(3,-7.675) 45(3.5,-7.675) 46(4,-7.675) 47(4.5,-7.675) 48(5,-7.675) 49(5.5,-7.675) 50(6,-7.675) 76(6,7.675) 77(5.5,7.675) 78(5,7.675) 79(4.5,7.675) 80(4,7.675) 81(3.5,7.675) 82(3,7.675) 83(2.5,7.675) 84(2,7.675) 85(1.5,7.675) 86(1,7.675) 87(0.5,7.675) 88(0,7.675) 89(-0.5,7.675) 90(-1,7.675) 91(-1.5,7.675) 92(-2,7.675) 93(-2.5,7.675) 94(-3,7.675) 95(-3.5,7.675) 96(-4,7.675) 97(-4.5,7.675) 98(-5,7.675) 99(-5.5,7.675) 100(-6,7.675)
  round 0.75 smd mask+0.375: FID1(-7.8,-7.8) FID2(7.8,7.8)
Top Layer keep-out:
  circle w0.01: c7.8,7.8 r0.745
  circle w0.01: c-7.8,-7.8 r0.745
Top Overlay:
  lines w0.2: -8.2,6.5 -7.1,6.5 -7.1,7.1 -6.5,7.1 ; -7.1,-6.5 -7.1,-7.1 -6.5,-7.1 ; 6.5,-7.1 7.1,-7.1 7.1,-6.5 ; 6.5,7.1 7.1,7.1 7.1,6.5
Top Designator:
  text ".Designator" at -4.511,-0.453 h2
Top Assembly:
  lines w0.127: -7,-7 -7,4.958 -4.958,7 7,7 7,-7 -7,-7
Top Courtyard:
  circle w0.05: c0,0 r0.25
  lines w0.05: -0.35,0 0.35,0 ; 0,-0.35 0,0.35 ; -8.6,-6.375 -8.6,6.375 -7.25,6.375 -7.25,7.25 -6.375,7.25 -6.375,8.6 6.375,8.6 6.375,7.25 7.25,7.25 7.25,6.375 8.6,6.375 8.6,-6.375 7.25,-6.375 7.25,-7.25 6.375,-7.25 6.375,-8.6 -6.375,-8.6 -6.375,-7.25 -7.25,-7.25 -7.25,-6.375 -8.6,-6.375
Top Component Outline:
  lines w0.025: -7,-7 7,-7 7,7 -7,7 -7,-7
Top Component Terminal:
  drawing of 400 lines, arcs and shapes, not listed
3D body "step_temp.STEP": height 1.6, standoff 0, extent -8,-8 8,8

## RASPBERRY_PI_3_MODEL_B+ [mm]
pads (44):
  rrect50% 1.7x1.7 hole 1.1 paste-1.65: 1(4.87,1.27)
  round 1.7 hole 1.1 paste-1.65: 2(4.87,-1.27) 3(7.41,1.27) 4(7.41,-1.27) 5(9.95,1.27) 6(9.95,-1.27) 7(12.49,1.27) 8(12.49,-1.27) 9(15.03,1.27) 10(15.03,-1.27) 11(17.57,1.27) 12(17.57,-1.27) 13(20.11,1.27) 14(20.11,-1.27) 15(22.65,1.27) 16(22.65,-1.27) 17(25.19,1.27) 18(25.19,-1.27) 19(27.73,1.27) 20(27.73,-1.27) 21(30.27,1.27) 22(30.27,-1.27) 23(32.81,1.27) 24(32.81,-1.27) 25(35.35,1.27) 26(35.35,-1.27) 27(37.89,1.27) 28(37.89,-1.27) 29(40.43,1.27) 30(40.43,-1.27) 31(42.97,1.27) 32(42.97,-1.27) 33(45.51,1.27) 34(45.51,-1.27) 35(48.05,1.27) 36(48.05,-1.27) 37(50.59,1.27) 38(50.59,-1.27) 39(53.13,1.27) 40(53.13,-1.27)
  round 5 hole 2.7: MT1(58,0) MT2(0,0) MT3(58,49) MT4(0,49)
Top Overlay:
  lines w0.2: 3.22,-2.62 3.22,1.845 3.995,2.62 54.62,2.62
Top Designator:
  text ".Designator" at 20.339,23.397 h2
Top Assembly:
  circle w0.35: c7.41,1.52 r0.5
  circle w0.35: c48.05,-1.02 r0.5
  circle w0.35: c50,50.625 r0.6
  circle w0.35: c73,48 r1.75
  circle w0.35: c27.73,-1.02 r0.5
  circle w0.35: c45.51,1.52 r0.5
  circle w0.35: c7.41,-1.02 r0.5
  circle w0.35: c56.73,7.393 r0.5
  circle w0.35: c58,49 r1.375
  circle w0.35: c56.73,4.853 r0.5
  circle w0.35: c15.03,1.52 r0.5
  circle w0.35: c20.11,1.52 r0.5
  circle w0.35: c45.51,-1.02 r0.5
  circle w0.35: c0,49 r1.375
  circle w0.35: c9.95,-1.02 r0.5
  circle w0.35: c30.27,-1.02 r0.5
  circle w0.35: c22.65,-1.02 r0.5
  circle w0.35: c40.43,-1.02 r0.5
  circle w0.35: c59.27,7.393 r0.5
  circle w0.35: c22.65,1.52 r0.5
  circle w0.35: c20.11,-1.02 r0.5
  circle w0.35: c17.57,-1.02 r0.5
  circle w0.35: c56.73,12.49 r0.5
  circle w0.35: c15.03,-1.02 r0.5
  circle w0.35: c50.59,-1.02 r0.5
  circle w0.35: c12.49,1.52 r0.5
  circle w0.35: c42.97,-1.02 r0.5
  circle w0.35: c9.95,1.52 r0.5
  circle w0.35: c30.27,1.52 r0.5
  circle w0.35: c58,0 r1.375
  circle w0.35: c35.35,1.52 r0.5
  circle w0.35: c42.97,1.52 r0.5
  circle w0.35: c40.43,1.52 r0.5
  circle w0.35: c53.13,-1.02 r0.5
  circle w0.35: c25.19,-1.02 r0.5
  circle w0.35: c37.89,-1.02 r0.5
  circle w0.35: c32.81,1.52 r0.5
  circle w0.35: c25.19,1.52 r0.5
  circle w0.35: c37.89,1.52 r0.5
  circle w0.35: c50.59,1.52 r0.5
  circle w0.35: c4.87,-1.02 r0.5
  circle w0.35: c17.57,1.52 r0.5
  circle w0.35: c53.13,1.52 r0.5
  circle w0.35: c27.73,1.52 r0.5
  circle w0.35: c35.35,-1.02 r0.5
  circle w0.35: c0,0 r1.375
  circle w0.35: c48.05,1.52 r0.5
  circle w0.35: c32.81,-1.02 r0.5
  circle w0.35: c59.27,12.49 r0.5
  circle w0.35: c12.49,-1.02 r0.5
  circle w0.35: c59.27,4.853 r0.5
  circle w0.35: c50,43.5 r0.6
  lines w0.35: 3.212,52.5 3.212,53.814 10.984,53.814 10.984,52.5 ; 20.942,52.5 20.942,54.079 35.942,54.079 35.942,52.5 ; 21.16,31.729 21.16,29.231 24.362,29.231 24.36,31.731 21.161,31.731 ; 47.103,52.458 47.103,54.958 53.103,54.958 53.103,52.458 ; 71.462,48.835 71.471,48.835 ; 72.645,38.214 ccw(c73,36.5) 71.25,36.5 ccw(c73,36.5) 73.399,38.204 ; 72.646,38.226 cw(c73.021,36.67) 73.396,38.226 ; 80.928,-2.016 83.459,-2.016 83.459,12.984 81.5,12.984 ; 81.25,50.335 83.771,50.335 83.771,34.435 81.5,34.435 ; 81.4,-0.4 cw(c78.4,-0.4) 78.4,-3.4 78.4,-3.5 -0.4,-3.5 -0.4,-3.4 cw(c-0.4,-0.4) -3.4,-0.4 -3.5,-0.4 -3.5,49.4 -3.4,49.4 cw(c-0.4,49.4) -0.4,52.4 -0.4,52.5 78.4,52.5 78.4,52.4 cw(c78.4,49.4) 81.4,49.4 ; 81.5,-0.4 81.5,49.4 ; 81.5,16.384 83.459,16.384 83.459,31.384 81.5,31.384 ; -2.226,18.48 -2.226,18.78 -2.226,20.193 cw(c-1.726,20.193) -1.726,20.693 -1.326,20.693 ccw(c-1.326,21.193) -0.826,21.193 -0.826,23.573 ccw(c-0.826,23.673) -0.826,23.773 -0.826,26.273 ccw(c-0.826,26.373) -0.826,26.473 -0.826,28.853 ccw(c-1.326,28.853) -1.326,29.353 -1.926,29.353 cw(c-1.926,29.653) -2.226,29.653 -2.226,30.18 -2.226,30.48 -0.476,30.48 9.174,30.48 9.174,18.48 -0.926,18.48 -2.226,18.48 ; 4.37,1.02 5.37,1.02 5.37,2.02 4.37,2.02 4.37,1.02 ; 20.942,42.529 21.442,42.529 21.442,44.504 20.942,44.504 20.942,42.529 ; 20.942,48.979 20.942,49.979 21.442,49.979 21.442,48.979 20.942,48.979 ; 33.978,12.988 ccw(c33.988,12.988) 33.988,12.978 45.968,12.978 ccw(c45.968,12.988) 45.978,12.988 45.978,24.968 ccw(c45.968,24.968) 45.968,24.978 33.988,24.978 ccw(c33.988,24.968) 33.978,24.968 33.978,12.988 ; 35.442,42.529 35.442,44.504 35.942,44.504 35.942,42.529 35.442,42.529 ; 35.442,48.979 35.942,48.979 35.942,49.979 35.442,49.979 35.442,48.979 ; 49.218,21.423 51.718,21.425 51.718,24.624 51.716,24.625 49.218,24.625 49.218,21.423
Top Courtyard:
  lines w0.05: -0.35,0 0.35,0 ; 0,-0.35 0,0.35
Top Component Outline:
  lines w0.025: 54.65,2.48 54.65,-2.52 3.62,-2.52 3.62,2.52 54.65,2.52
Top Component Terminal:
  drawing of 160 lines, arcs and shapes, not listed
3D body "RaspberryPi3.stp": height 14.74, standoff -5.26, extent -3.5,-3.5 83.771,54.958

## RESAV375W80L1650D550 [mm]
height 20.5
pads (2):
  rrect50% 1.6x1.6 hole 1.1: 1(-0.025,0)
  round 1.6 hole 1.1: 2(3.75,0)
Top Overlay:
  circle w0.2: c-0.025,0 r2.5
3D body "RESAV_2W.stp": height 19.9, standoff -2.5, extent -2.525,-2.497 4.124,2.497

## RESC200X125X60L35 [mm] "Resistor, Chip; 2.00 mm L X 1.25 mm W X 0.60 mm H body"
height 0.6
pads (2):
  rrect46% 1.1x1.4 smd: 1(-0.95,0) 2(0.95,0)
Top Overlay:
  lines w0.2: -0.3,-0.9 0.3,-0.9 ; -0.3,0.9 0.3,0.9
Top Designator:
  text ".Designator" at -4.511,-0.453 h2
Top Assembly:
  lines w0.1: -1.05,-0.68 1.05,-0.68 1.05,0.68 -1.05,0.68 -1.05,-0.68
Top Courtyard:
  circle w0.05: c0,0 r0.25
  lines w0.05: -0.35,0 0.35,0 ; 0,-0.35 0,0.35 ; -1.7,-1.1 -1.7,1.1 1.7,1.1 1.7,-1.1 -1.7,-1.1
Top Component Outline:
  lines w0.025: -1,-0.625 1,-0.625 1,0.625 -1,0.625 -1,-0.625
Top Component Terminal:
  lines w0.025: -1,-0.625 -1,0.625 -0.5,0.625 -0.5,-0.625 -1,-0.625 ; 0.5,-0.625 1,-0.625 1,0.625 0.5,0.625 0.5,-0.625
3D body "RESC200X125X60X35.stp": height 0.6, standoff 0, extent -1,-0.625 1,0.625

## RESC310X160X65L40N [mm] "Resistor, Chip; 3.10 mm L X 1.60 mm W X 0.65 mm H body"
height 0.65
pads (2):
  rrect36% 1.4x1.8 smd: 1(-1.6,0) 2(1.6,0)
Top Overlay:
  lines w0.2: -0.605,-0.85 0.605,-0.85 ; -0.605,0.85 0.605,0.85
Top Designator:
  text ".Designator" at 0,0 h2
Top Assembly:
  lines w0.35: -1.6,-0.85 1.6,-0.85 1.6,0.85 -1.6,0.85 -1.6,-0.85
Top Courtyard:
  circle w0.05: c0,0 r0.25
  lines w0.05: -0.35,0 0.35,0 ; 0,-0.35 0,0.35 ; -2.51,-1.1 2.51,-1.1 2.51,1.1 -2.51,1.1 -2.51,-1.1
Top Component Outline:
  lines w0.05: -1.55,-0.8 1.55,-0.8 1.55,0.8 -1.55,0.8 -1.55,-0.8
Top Component Terminal:
  lines w0.05: -1.55,-0.8 -1.55,0.8 -1.15,0.8 -1.15,-0.8 -1.55,-0.8 ; 1.15,-0.8 1.55,-0.8 1.55,0.8 1.15,0.8 1.15,-0.8
3D body "RESC310X160X65L40.STEP": height 0.65, standoff 0, extent -1.55,-0.8 1.55,0.8

## RESC500X250X65L50N [mm] "Resistor, Chip; 5.00mm L X 2.50 mm W X 0.65 mm H body"
height 0.65
pads (2):
  rrect36% 1.3x2.7 smd: 1(-2.5,0) 2(2.5,0)
Top Overlay:
  lines w0.2: -1.5,-1.35 1.5,-1.35 ; -1.5,1.35 1.5,1.35
Top Designator:
  text ".Designator" at 0,0 h2
Top Assembly:
  lines w0.35: -2.5,-1.25 2.5,-1.25 2.5,1.25 -2.5,1.25 -2.5,-1.25
Top Courtyard:
  lines w0.05: -0.35,0 0.35,0 ; 0,-0.35 0,0.35 ; -3.35,-1.55 3.35,-1.55 3.35,1.55 -3.35,1.55 -3.35,-1.55
Top Component Outline:
  lines w0.05: -2.5,-1.25 2.5,-1.25 2.5,1.25 -2.5,1.25 -2.5,-1.25
Top Component Terminal:
  lines w0.05: -2.5,-1.25 -2.5,1.25 -2,1.25 -2,-1.25 -2.5,-1.25 ; 2,-1.25 2.5,-1.25 2.5,1.25 2,1.25 2,-1.25
3D body "RESC500X250X65L50.STEP.stp": height 0.65, standoff 0, extent -2.5,-1.25 2.5,1.25

## RESC635X320X65L50N [mm] "Resistor, Chip; 6.35 mm L X 3.20 mm W X 0.65 mm H body"
height 0.65
pads (2):
  rrect50% 1.3x3.4 smd: 1(-3.15,0) 2(3.15,0)
Top Overlay:
  lines w0.2: -2.2,-1.8 2.2,-1.8 ; -2.2,1.8 2.2,1.8
Top Designator:
  text ".Designator" at 0,0 h2
Top Assembly:
  lines w0.35: -3.175,-1.6 3.175,-1.6 3.175,1.6 -3.175,1.6 -3.175,-1.6
Top Courtyard:
  lines w0.05: -0.35,0 0.35,0 ; 0,-0.35 0,0.35 ; -4.05,-2 -4.05,2 4.05,2 4.05,-2 -4.05,-2
Top Component Outline:
  lines w0.025: -3.175,-1.6 3.175,-1.6 3.175,1.6 -3.175,1.6 -3.175,-1.6
3D body "RESC635X320X65L50N.stp": height 0.65, standoff 0, extent -3.175,-1.6 3.175,1.6